# Altium schematic symbol library INA333AIDGKR.SchLib: 1 symbol
Pins are listed as number, name and electrical type; pins without a type are passive.

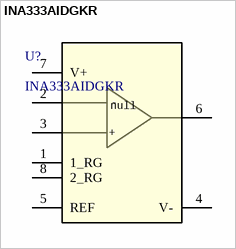
[diagram p0: symbol INA333AIDGKR]

## INA333AIDGKR
designator U?
Low-Power, Zero-Drift, Precision Instrumentation Amplifier 8-VSSOP -40 to 125; Manufacturer_Name: Texas Instruments; TYPE: TYPE; RefDes: RefDes; Copyright: Copyright (C) 2025 Ultra Librarian. All rights reserved.; Manufacturer_Part_Number: INA333AIDGKR
footprint DGK0008A-IPC_A
pins: 1 1_RG, 2 VIN- (hiz), 3 VIN+ (hiz), 4 V- (power), 5 REF, 6 VOUT, 7 V+ (power), 8 2_RG
text: null; -; +